# Altium footprint library DATALOGER_RevA.PcbLib: 37 footprints (part 2 of 3)
Each footprint in its own frame and in the unit in brackets; x right, y up, seen from the top. Pads: shape width x height; smd on the part's side, far side on the other; paste and mask are expansions set on the pad; w line width, h text height; cw(c..) or ccw(c..) is an arc to the next point about the centre after c.
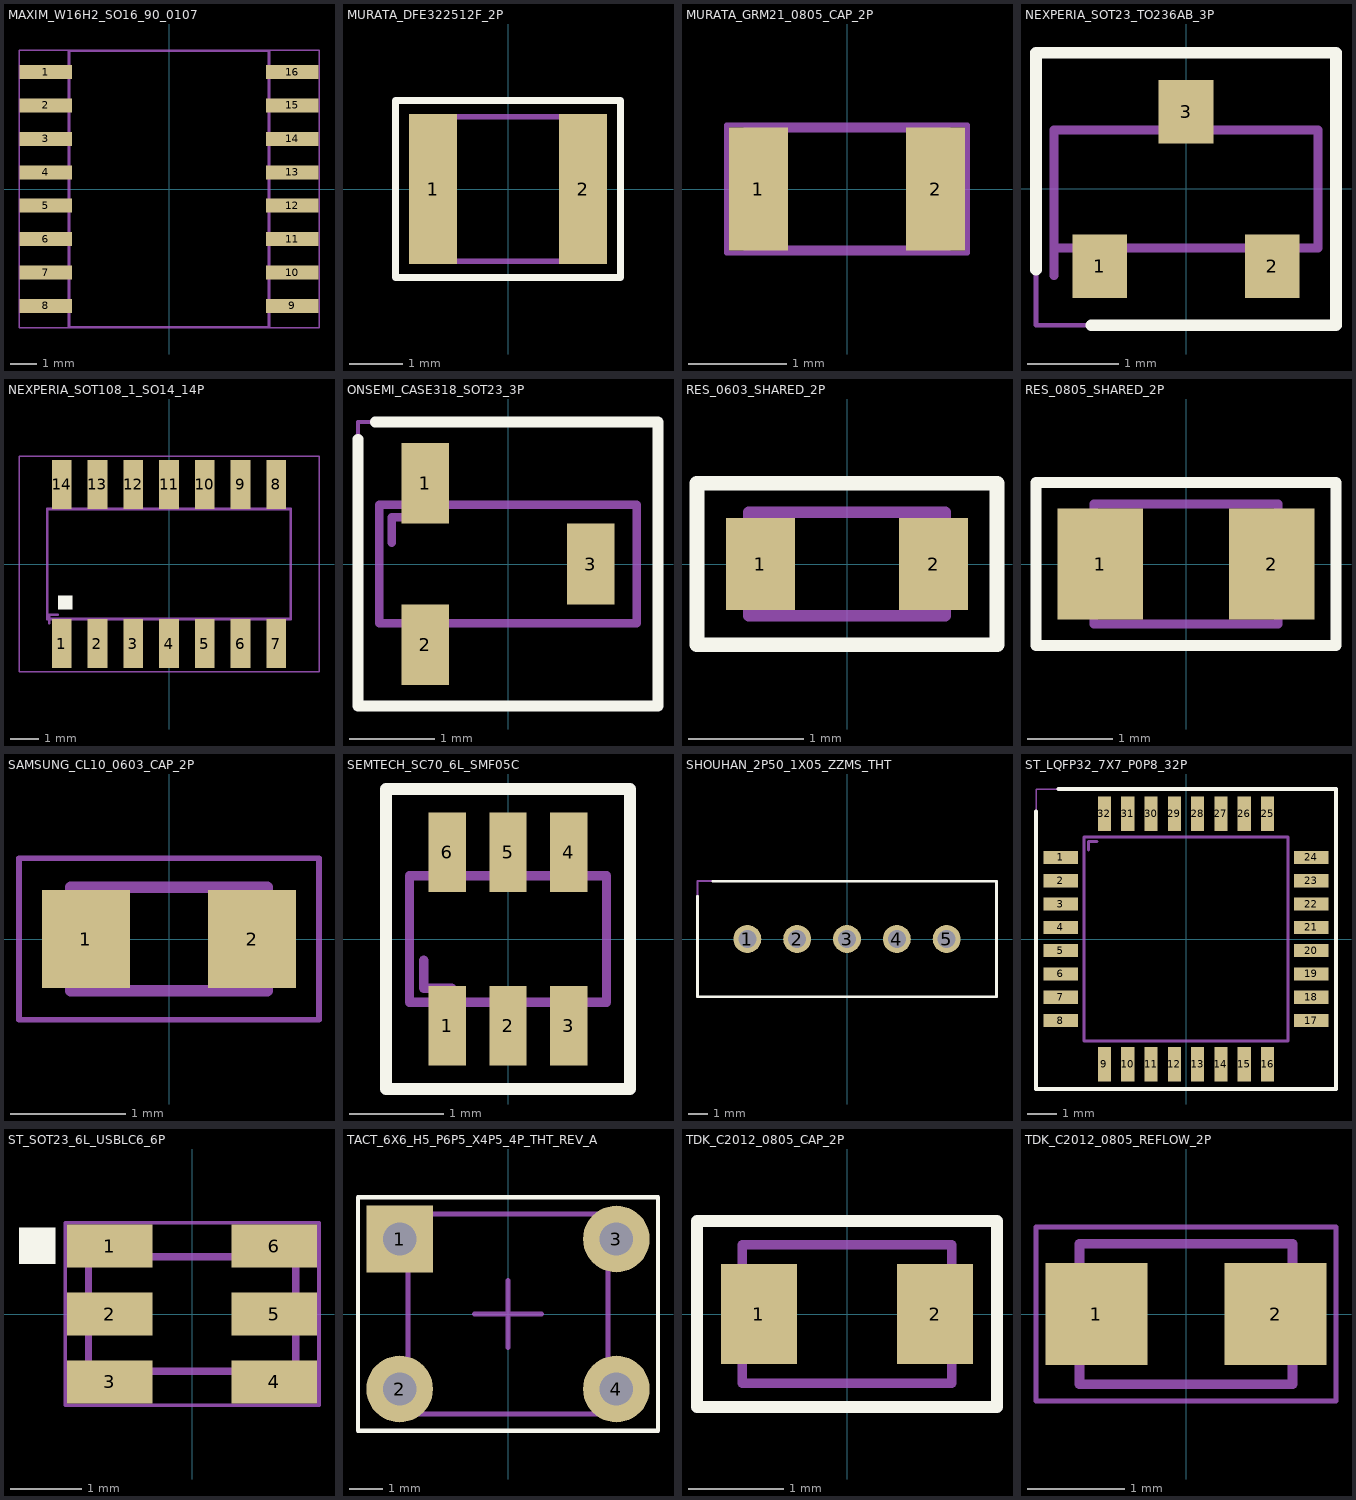
[diagram p1: the footprints below, top view; thin cyan lines are the x and y axes]

## MAXIM_W16H2_SO16_90_0107 [mm] "DS3231SN# W16#H2 / SO16 300mil"
pads (16):
  rect 1.98x0.53 smd paste+0: 1(-4.685,4.445) 2(-4.685,3.175) 3(-4.685,1.905) 4(-4.685,0.635) 5(-4.685,-0.635) 6(-4.685,-1.905) 7(-4.685,-3.175) 8(-4.685,-4.445) 9(4.685,-4.445) 10(4.685,-3.175) 11(4.685,-1.905) 12(4.685,-0.635) 13(4.685,0.635) 14(4.685,1.905) 15(4.685,3.175) 16(4.685,4.445)
Mechanical 1:
  lines w0.1: -3.8,-5.25 -3.8,5.25 3.8,5.25 3.8,-5.25 -3.8,-5.25
Top Courtyard:
  lines w0.05: -5.7,-5.275 -5.7,5.275 5.7,5.275 5.7,-5.275 -5.7,-5.275

## MURATA_DFE322512F_2P [mm] "Datalogger Rev-A G002"
pads (2):
  rect 0.9x2.8 smd paste+0: 1(-1.4,0) 2(1.4,0)
Top Overlay:
  lines w0.127: -2.1,-1.65 2.1,-1.65 2.1,1.65 -2.1,1.65 -2.1,-1.65
Mechanical 1:
  lines w0.1: -1.7,-1.35 -1.7,1.35 1.7,1.35 1.7,-1.35 -1.7,-1.35
Top Courtyard:
  lines w0.05: -2.1,-1.65 -2.1,1.65 2.1,1.65 2.1,-1.65 -2.1,-1.65

## MURATA_GRM21_0805_CAP_2P [mm] "Murata GRM21 2012/0805"
pads (2):
  rect 0.6x1.25 smd paste+0: 1(-0.9,0) 2(0.9,0)
Mechanical 1:
  lines w0.1: -1,-0.625 -1,0.625 1,0.625 1,-0.625 -1,-0.625
Top Courtyard:
  lines w0.05: -1.225,-0.65 -1.225,0.65 1.225,0.65 1.225,-0.65 -1.225,-0.65

## NEXPERIA_SOT23_TO236AB_3P [mm] "Nexperia BC847B SOT23/TO-236AB"
pads (3):
  rect 0.6x0.7 smd paste+0: 1(-0.95,-0.85) 2(0.95,-0.85) 3(0,0.85)
Top Overlay:
  lines w0.127: -1.65,-0.89 -1.65,1.5 1.65,1.5 1.65,-1.5 -1.04,-1.5
Mechanical 1:
  lines w0.1: -1.45,-0.95 -1.45,-0.65 ; -1.15,-0.65 -1.45,-0.65 ; -1.45,-0.65 1.45,-0.65 1.45,0.65 -1.45,0.65 -1.45,-0.65
Top Courtyard:
  lines w0.05: -1.65,-1.5 1.65,-1.5 1.65,1.5 -1.65,1.5 -1.65,-1.5

## NEXPERIA_SOT108_1_SO14_14P [mm] "Nexperia SO14/SOT108-1"
pads (14):
  rect 0.7x1.75 smd paste+0: 1(-3.81,-2.825) 2(-2.54,-2.825) 3(-1.27,-2.825) 4(0,-2.825) 5(1.27,-2.825) 6(2.54,-2.825) 7(3.81,-2.825) 8(3.81,2.825) 9(2.54,2.825) 10(1.27,2.825) 11(0,2.825) 12(-1.27,2.825) 13(-2.54,2.825) 14(-3.81,2.825)
Top Overlay:
  region: -3.937,-1.112 -3.937,-1.62 -3.429,-1.62 -3.429,-1.112
Mechanical 1:
  lines w0.1: -4.25,-2.1 -4.25,-1.8 -3.95,-1.8 ; -4.325,-1.95 4.325,-1.95 4.325,1.95 -4.325,1.95 -4.325,-1.95
Top Courtyard:
  lines w0.05: -5.325,-3.825 5.325,-3.825 5.325,3.825 -5.325,3.825 -5.325,-3.825

## ONSEMI_CASE318_SOT23_3P [mm] "Datalogger Rev-A G006"
pads (3):
  rect 0.56x0.95 smd paste+0: 1(-0.975,0.95) 2(-0.975,-0.95) 3(0.975,0)
Top Overlay:
  lines w0.127: -1.77,1.472 -1.77,-1.675 1.77,-1.675 1.77,1.675 -1.567,1.675
Mechanical 1:
  lines w0.1: -1.37,0.25 -1.37,0.55 -1.07,0.55 ; -1.52,-0.7 1.52,-0.7 1.52,0.7 -1.52,0.7 -1.52,-0.7
Top Courtyard:
  lines w0.05: -1.77,-1.675 1.77,-1.675 1.77,1.675 -1.77,1.675 -1.77,-1.675

## RES_0603_SHARED_2P [mm] "Datalogger Rev-A G010"
pads (2):
  rect 0.6x0.8 smd paste+0: 1(-0.75,0) 2(0.75,0)
Top Overlay:
  lines w0.127: -1.3,-0.7 -1.3,0.7 1.3,0.7 1.3,-0.7 -1.3,-0.7
Mechanical 1:
  lines w0.1: -0.85,-0.45 0.85,-0.45 0.85,0.45 -0.85,0.45 -0.85,-0.45
Top Courtyard:
  lines w0.05: -1.3,-0.7 1.3,-0.7 1.3,0.7 -1.3,0.7 -1.3,-0.7

## RES_0805_SHARED_2P [mm] "Datalogger Rev-A G011"
pads (2):
  rect 1x1.3 smd paste+0: 1(-1,0) 2(1,0)
Top Overlay:
  lines w0.127: -1.75,-0.95 -1.75,0.95 1.75,0.95 1.75,-0.95 -1.75,-0.95
Mechanical 1:
  lines w0.1: -1.075,-0.7 1.075,-0.7 1.075,0.7 -1.075,0.7 -1.075,-0.7
Top Courtyard:
  lines w0.05: -1.75,-0.95 1.75,-0.95 1.75,0.95 -1.75,0.95 -1.75,-0.95

## SAMSUNG_CL10_0603_CAP_2P [mm] "Samsung CL10 1608/0603 MLCC reflow land"
pads (2):
  rect 0.76x0.85 smd paste+0: 1(-0.72,0) 2(0.72,0)
Mechanical 1:
  lines w0.1: -0.85,-0.45 0.85,-0.45 0.85,0.45 -0.85,0.45 -0.85,-0.45
Top Courtyard:
  lines w0.05: -1.3,-0.7 1.3,-0.7 1.3,0.7 -1.3,0.7 -1.3,-0.7

## SEMTECH_SC70_6L_SMF05C [mm] "Datalogger Rev-A G004"
pads (6):
  rect 0.4x0.85 smd paste+0: 1(-0.65,-0.925) 2(0,-0.925) 3(0.65,-0.925) 4(0.65,0.925) 5(0,0.925) 6(-0.65,0.925)
Top Overlay:
  lines w0.127: -1.3,-1.6 1.3,-1.6 1.3,1.6 -1.3,1.6 -1.3,-1.6
Mechanical 1:
  lines w0.1: -0.9,-0.225 -0.9,-0.525 -0.6,-0.525 ; -1.05,-0.675 -1.05,0.675 1.05,0.675 1.05,-0.675 -1.05,-0.675
Top Courtyard:
  lines w0.05: -1.3,-1.6 -1.3,1.6 1.3,1.6 1.3,-1.6 -1.3,-1.6

## SHOUHAN_2P50_1X05_ZZMS_THT [mm] "SHOUHAN 2.54mm-5P ZZ-MS exact Task17 PTH padstack"
pads (5):
  round 1.4 hole 0.9: 1(-5,0) 2(-2.5,0) 3(0,0) 4(2.5,0) 5(5,0)
Top Overlay:
  lines w0.127: -7.5,2.138 -7.5,-2.9 7.5,-2.9 7.5,2.9 -6.738,2.9
Mechanical 1:
  lines w0.1: -7.5,-2.9 -7.5,2.9 7.5,2.9 7.5,-2.9 -7.5,-2.9
Top Courtyard:
  lines w0.05: -7.525,-2.925 7.525,-2.925 7.525,2.925 -7.525,2.925 -7.525,-2.925

## ST_LQFP32_7X7_P0P8_32P [mm] "STM32G070KBT6 LQFP32 copper candidate"
pads (32):
  rect 1.2x0.45 smd paste+0: 1(-4.3,2.8) 2(-4.3,2) 3(-4.3,1.2) 4(-4.3,0.4) 5(-4.3,-0.4) 6(-4.3,-1.2) 7(-4.3,-2) 8(-4.3,-2.8) 17(4.3,-2.8) 18(4.3,-2) 19(4.3,-1.2) 20(4.3,-0.4) 21(4.3,0.4) 22(4.3,1.2) 23(4.3,2) 24(4.3,2.8)
  rect 0.45x1.2 smd paste+0: 9(-2.8,-4.3) 10(-2,-4.3) 11(-1.2,-4.3) 12(-0.4,-4.3) 13(0.4,-4.3) 14(1.2,-4.3) 15(2,-4.3) 16(2.8,-4.3) 25(2.8,4.3) 26(2,4.3) 27(1.2,4.3) 28(0.4,4.3) 29(-0.4,4.3) 30(-1.2,4.3) 31(-2,4.3) 32(-2.8,4.3)
Top Overlay:
  lines w0.127: -5.15,4.388 -5.15,-5.15 5.15,-5.15 5.15,5.15 -4.388,5.15
Mechanical 1:
  lines w0.1: -3.35,3.05 -3.35,3.35 -3.05,3.35 ; -3.5,-3.5 3.5,-3.5 3.5,3.5 -3.5,3.5 -3.5,-3.5
Top Courtyard:
  lines w0.05: -5.15,-5.15 5.15,-5.15 5.15,5.15 -5.15,5.15 -5.15,-5.15

## ST_SOT23_6L_USBLC6_6P [mm] "ST USBLC6-2SC6 SOT23-6L"
pads (6):
  rect 1.2x0.6 smd paste+0: 1(-1.15,0.95) 2(-1.15,0) 3(-1.15,-0.95) 4(1.15,-0.95) 5(1.15,0) 6(1.15,0.95)
Top Overlay:
  region: -2.42,1.209 -2.42,0.701 -1.912,0.701 -1.912,1.209
Mechanical 1:
  lines w0.1: -1.4,1.1 -1.4,0.8 -1.1,0.8 ; -1.45,-0.8 -1.45,0.8 1.45,0.8 1.45,-0.8 -1.45,-0.8
Top Courtyard:
  lines w0.05: -1.775,-1.275 1.775,-1.275 1.775,1.275 -1.775,1.275 -1.775,-1.275

## TACT_6X6_H5_P6P5_X4P5_4P_THT_REV_A [mm] "TP-1101A-compatible tactile reset switch"
height 5
pads (4):
  rect 2x2 hole 1 paste-2539.97: 1(-3.25,2.25)
  round 2 hole 1 paste-2539.97: 2(-3.25,-2.25) 3(3.25,2.25) 4(3.25,-2.25)
Top Overlay:
  lines w0.127: -4.5,-3.5 4.5,-3.5 4.5,3.5 -4.5,3.5 -4.5,-3.5
Mechanical 1:
  lines w0.15: -1,0 1,0 ; 0,-1 0,1 ; -3,-3 -3,3 3,3 3,-3 -3,-3
Top Courtyard:
  lines w0.1: -4.5,-3.5 -4.5,3.5 4.5,3.5 4.5,-3.5 -4.5,-3.5

## TDK_C2012_0805_CAP_2P [mm] "Datalogger Rev-A G009"
pads (2):
  rect 0.8x1.05 smd paste+0: 1(-0.925,0) 2(0.925,0)
Top Overlay:
  lines w0.127: -1.575,-0.975 1.575,-0.975 1.575,0.975 -1.575,0.975 -1.575,-0.975
Mechanical 1:
  lines w0.1: -1.1,-0.725 -1.1,0.725 1.1,0.725 1.1,-0.725 -1.1,-0.725
Top Courtyard:
  lines w0.05: -1.575,-0.975 -1.575,0.975 1.575,0.975 1.575,-0.975 -1.575,-0.975

## TDK_C2012_0805_REFLOW_2P [mm] "TDK C2012 EIA0805 manufacturer reflow land"
pads (2):
  rect 1.05x1.05 smd paste+0: 1(-0.925,0) 2(0.925,0)
Mechanical 1:
  lines w0.1: -1.1,-0.725 1.1,-0.725 1.1,0.725 -1.1,0.725 -1.1,-0.725
Top Courtyard:
  lines w0.05: -1.55,-0.9 1.55,-0.9 1.55,0.9 -1.55,0.9 -1.55,-0.9